# Altium footprint library MY_LIB_Connectors_CONNFLY.PcbLib: 239 footprints (part 1 of 15)
Each footprint in its own frame and in the unit in brackets; x right, y up, seen from the top. Pads: shape width x height; smd on the part's side, far side on the other; paste and mask are expansions set on the pad; w line width, h text height; cw(c..) or ccw(c..) is an arc to the next point about the centre after c.
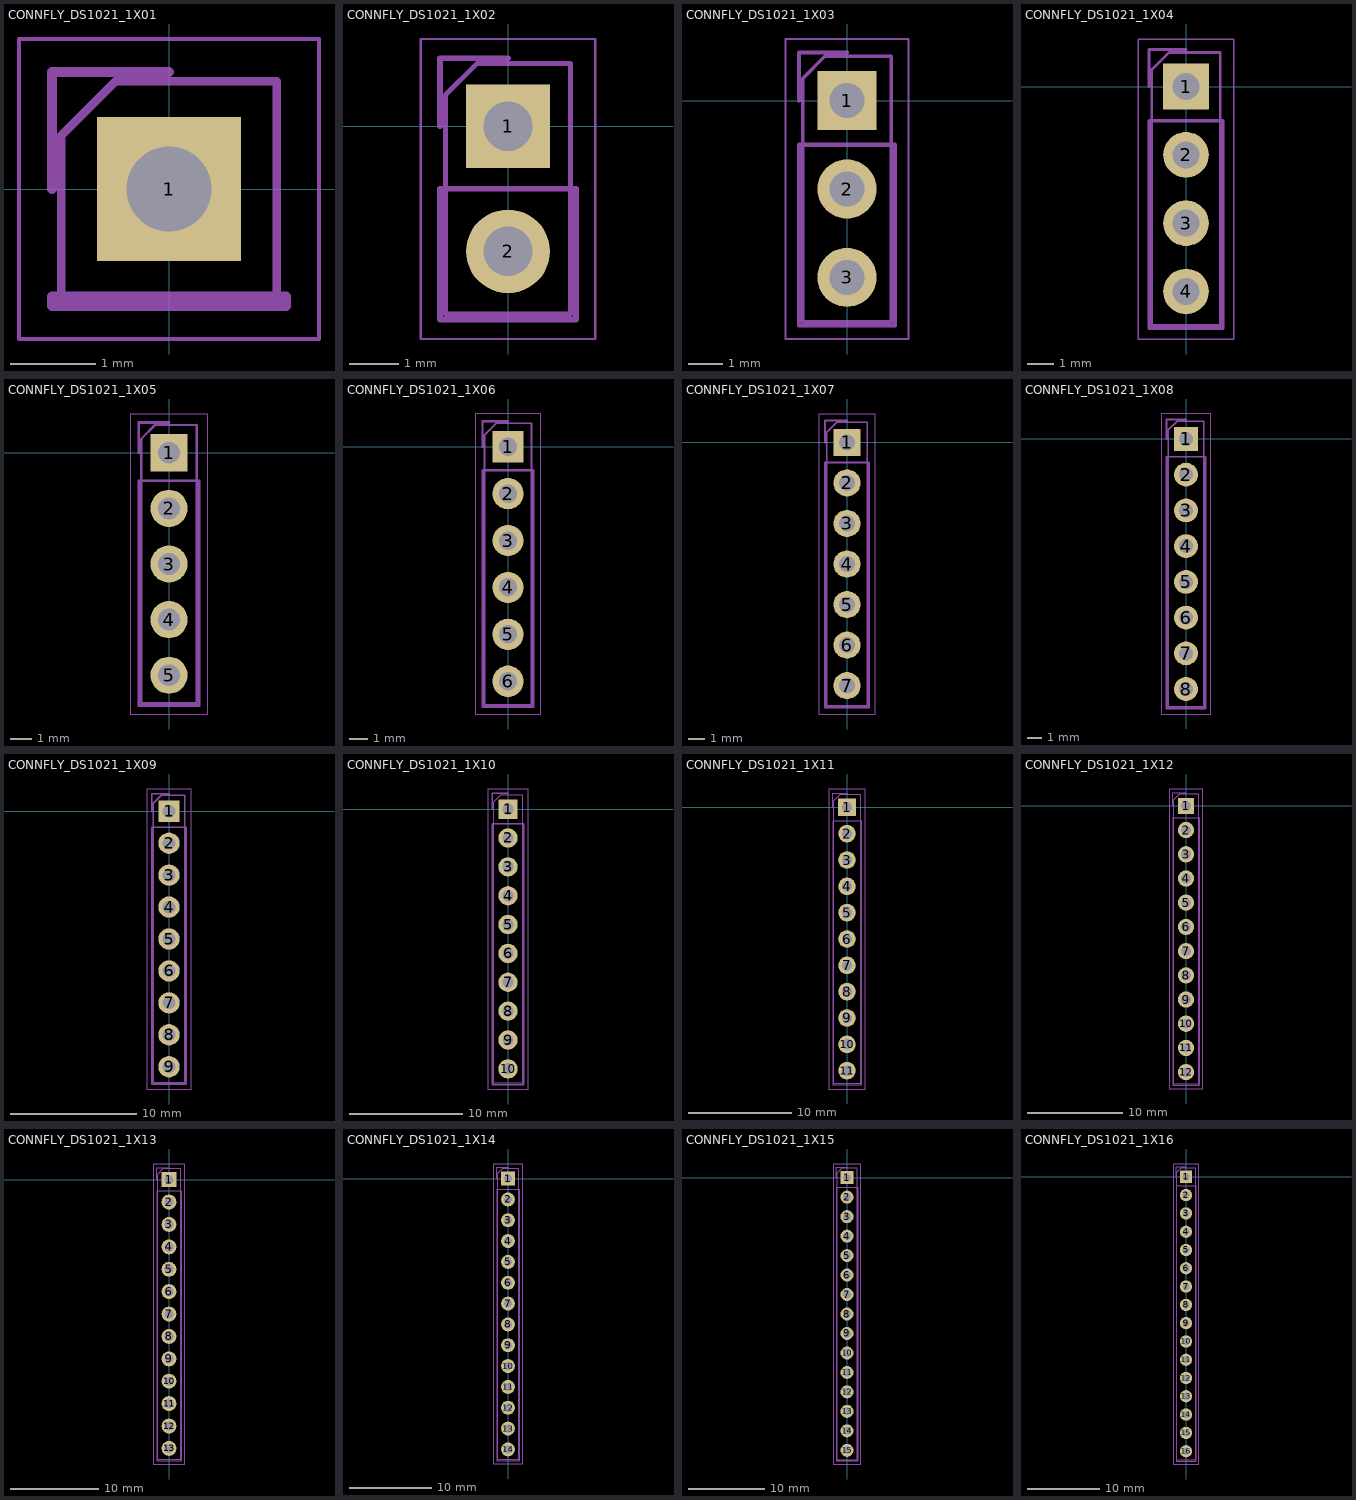
[diagram p0: the footprints below, top view; thin cyan lines are the x and y axes]

## CONNFLY_DS1021_1X01 [mm] "Connfly DS1021 1x1 standard KiCad; PTH1.0 pad1.7 pitch2.54; CC-BY-SA-4.0; STEP generic"
height 8.54
pads (1):
  rect 1.7x1.7 hole 1 paste-2539.97 mask+0.05: 1(0,0)
Mechanical 15:
  lines w0.05: -1.77,-1.77 1.77,-1.77 1.77,1.77 -1.77,1.77 -1.77,-1.77
  lines w0.1: -1.27,-1.27 1.27,-1.27 1.27,1.27 -0.635,1.27 -1.27,0.635 -1.27,-1.27
  lines w0.12: -1.38,0 -1.38,1.38 0,1.38 ; -1.38,-1.38 1.38,-1.38 1.38,-1.27 -1.38,-1.27 -1.38,-1.38
3D body "PinHeader_1x01_P2.54mm_Vertical.step": height 8.54, standoff -3, extent -1.27,-1.27 1.27,1.27

## CONNFLY_DS1021_1X02 [mm] "Connfly DS1021 1x2 standard KiCad; PTH1.0 pad1.7 pitch2.54; CC-BY-SA-4.0; STEP generic"
height 8.54
pads (2):
  rect 1.7x1.7 hole 1 paste-2539.97 mask+0.05: 1(0,0)
  round 1.7 hole 1 paste-2539.97 mask+0.05: 2(0,-2.54)
Mechanical 15:
  lines w0.05: -1.77,-4.32 -1.77,1.77 1.77,1.77 1.77,-4.32 -1.77,-4.32
  lines w0.1: -1.27,-3.81 -1.27,0.635 -0.635,1.27 1.27,1.27 1.27,-3.81 -1.27,-3.81
  lines w0.12: -1.38,0 -1.38,1.38 0,1.38 ; -1.38,-3.92 -1.38,-1.27 1.38,-1.27 1.38,-3.92 -1.38,-3.92
3D body "PinHeader_1x02_P2.54mm_Vertical.step": height 8.54, standoff -3, extent -1.27,-3.81 1.27,1.27

## CONNFLY_DS1021_1X03 [mm] "Connfly DS1021 1x3 standard KiCad; PTH1.0 pad1.7 pitch2.54; CC-BY-SA-4.0; STEP generic"
height 8.54
pads (3):
  rect 1.7x1.7 hole 1 paste-2539.97 mask+0.05: 1(0,0)
  round 1.7 hole 1 paste-2539.97 mask+0.05: 2(0,-2.54) 3(0,-5.08)
Mechanical 15:
  lines w0.05: -1.77,-6.85 -1.77,1.77 1.77,1.77 1.77,-6.85 -1.77,-6.85
  lines w0.1: -1.27,-6.35 -1.27,0.635 -0.635,1.27 1.27,1.27 1.27,-6.35 -1.27,-6.35
  lines w0.12: -1.38,0 -1.38,1.38 0,1.38 ; -1.38,-6.46 -1.38,-1.27 1.38,-1.27 1.38,-6.46 -1.38,-6.46
3D body "PinHeader_1x03_P2.54mm_Vertical.step": height 8.54, standoff -3, extent -1.27,-6.35 1.27,1.27

## CONNFLY_DS1021_1X04 [mm] "Connfly DS1021 1x4 standard KiCad; PTH1.0 pad1.7 pitch2.54; CC-BY-SA-4.0; STEP generic"
height 8.54
pads (4):
  rect 1.7x1.7 hole 1 paste-2539.97 mask+0.05: 1(0,0)
  round 1.7 hole 1 paste-2539.97 mask+0.05: 2(0,-2.54) 3(0,-5.08) 4(0,-7.62)
Mechanical 15:
  lines w0.05: -1.77,-9.39 -1.77,1.77 1.77,1.77 1.77,-9.39 -1.77,-9.39
  lines w0.1: -1.27,-8.89 -1.27,0.635 -0.635,1.27 1.27,1.27 1.27,-8.89 -1.27,-8.89
  lines w0.12: -1.38,0 -1.38,1.38 0,1.38 ; -1.38,-9 -1.38,-1.27 1.38,-1.27 1.38,-9 -1.38,-9
3D body "PinHeader_1x04_P2.54mm_Vertical.step": height 8.54, standoff -3, extent -1.27,-8.89 1.27,1.27

## CONNFLY_DS1021_1X05 [mm] "Connfly DS1021 1x5 standard KiCad; PTH1.0 pad1.7 pitch2.54; CC-BY-SA-4.0; STEP generic"
height 8.54
pads (5):
  rect 1.7x1.7 hole 1 paste-2539.97 mask+0.05: 1(0,0)
  round 1.7 hole 1 paste-2539.97 mask+0.05: 2(0,-2.54) 3(0,-5.08) 4(0,-7.62) 5(0,-10.16)
Mechanical 15:
  lines w0.05: -1.77,-11.93 -1.77,1.77 1.77,1.77 1.77,-11.93 -1.77,-11.93
  lines w0.1: -1.27,-11.43 -1.27,0.635 -0.635,1.27 1.27,1.27 1.27,-11.43 -1.27,-11.43
  lines w0.12: -1.38,0 -1.38,1.38 0,1.38 ; -1.38,-11.54 -1.38,-1.27 1.38,-1.27 1.38,-11.54 -1.38,-11.54
3D body "PinHeader_1x05_P2.54mm_Vertical.step": height 8.54, standoff -3, extent -1.27,-11.43 1.27,1.27

## CONNFLY_DS1021_1X06 [mm] "Connfly DS1021 1x6 standard KiCad; PTH1.0 pad1.7 pitch2.54; CC-BY-SA-4.0; STEP generic"
height 8.54
pads (6):
  rect 1.7x1.7 hole 1 paste-2539.97 mask+0.05: 1(0,0)
  round 1.7 hole 1 paste-2539.97 mask+0.05: 2(0,-2.54) 3(0,-5.08) 4(0,-7.62) 5(0,-10.16) 6(0,-12.7)
Mechanical 15:
  lines w0.05: -1.77,-14.47 -1.77,1.77 1.77,1.77 1.77,-14.47 -1.77,-14.47
  lines w0.1: -1.27,-13.97 -1.27,0.635 -0.635,1.27 1.27,1.27 1.27,-13.97 -1.27,-13.97
  lines w0.12: -1.38,0 -1.38,1.38 0,1.38 ; -1.38,-14.08 -1.38,-1.27 1.38,-1.27 1.38,-14.08 -1.38,-14.08
3D body "PinHeader_1x06_P2.54mm_Vertical.step": height 8.54, standoff -3, extent -1.27,-13.97 1.27,1.27

## CONNFLY_DS1021_1X07 [mm] "Connfly DS1021 1x7 standard KiCad; PTH1.0 pad1.7 pitch2.54; CC-BY-SA-4.0; STEP generic"
height 8.54
pads (7):
  rect 1.7x1.7 hole 1 paste-2539.97 mask+0.05: 1(0,0)
  round 1.7 hole 1 paste-2539.97 mask+0.05: 2(0,-2.54) 3(0,-5.08) 4(0,-7.62) 5(0,-10.16) 6(0,-12.7) 7(0,-15.24)
Mechanical 15:
  lines w0.05: -1.77,-17.02 -1.77,1.78 1.77,1.78 1.77,-17.02 -1.77,-17.02
  lines w0.1: -1.27,-16.51 -1.27,0.635 -0.635,1.27 1.27,1.27 1.27,-16.51 -1.27,-16.51
  lines w0.12: -1.38,0 -1.38,1.38 0,1.38 ; -1.38,-16.62 -1.38,-1.27 1.38,-1.27 1.38,-16.62 -1.38,-16.62
3D body "PinHeader_1x07_P2.54mm_Vertical.step": height 8.54, standoff -3, extent -1.27,-16.51 1.27,1.27

## CONNFLY_DS1021_1X08 [mm] "Connfly DS1021 1x8 standard KiCad; PTH1.0 pad1.7 pitch2.54; CC-BY-SA-4.0; STEP generic"
height 8.54
pads (8):
  rect 1.7x1.7 hole 1 paste-2539.97 mask+0.05: 1(0,0)
  round 1.7 hole 1 paste-2539.97 mask+0.05: 2(0,-2.54) 3(0,-5.08) 4(0,-7.62) 5(0,-10.16) 6(0,-12.7) 7(0,-15.24) 8(0,-17.78)
Mechanical 15:
  lines w0.05: -1.77,-19.55 -1.77,1.77 1.77,1.77 1.77,-19.55 -1.77,-19.55
  lines w0.1: -1.27,-19.05 -1.27,0.635 -0.635,1.27 1.27,1.27 1.27,-19.05 -1.27,-19.05
  lines w0.12: -1.38,0 -1.38,1.38 0,1.38 ; -1.38,-19.16 -1.38,-1.27 1.38,-1.27 1.38,-19.16 -1.38,-19.16
3D body "PinHeader_1x08_P2.54mm_Vertical.step": height 8.54, standoff -3, extent -1.27,-19.05 1.27,1.27

## CONNFLY_DS1021_1X09 [mm] "Connfly DS1021 1x9 standard KiCad; PTH1.0 pad1.7 pitch2.54; CC-BY-SA-4.0; STEP generic"
height 8.54
pads (9):
  rect 1.7x1.7 hole 1 paste-2539.97 mask+0.05: 1(0,0)
  round 1.7 hole 1 paste-2539.97 mask+0.05: 2(0,-2.54) 3(0,-5.08) 4(0,-7.62) 5(0,-10.16) 6(0,-12.7) 7(0,-15.24) 8(0,-17.78) 9(0,-20.32)
Mechanical 15:
  lines w0.05: -1.77,-22.09 -1.77,1.77 1.77,1.77 1.77,-22.09 -1.77,-22.09
  lines w0.1: -1.27,-21.59 -1.27,0.635 -0.635,1.27 1.27,1.27 1.27,-21.59 -1.27,-21.59
  lines w0.12: -1.38,0 -1.38,1.38 0,1.38 ; -1.38,-21.7 -1.38,-1.27 1.38,-1.27 1.38,-21.7 -1.38,-21.7
3D body "PinHeader_1x09_P2.54mm_Vertical.step": height 8.54, standoff -3, extent -1.27,-21.59 1.27,1.27

## CONNFLY_DS1021_1X10 [mm] "Connfly DS1021 1x10 standard KiCad; PTH1.0 pad1.7 pitch2.54; CC-BY-SA-4.0; STEP generic"
height 8.54
pads (10):
  rect 1.7x1.7 hole 1 paste-2539.97 mask+0.05: 1(0,0)
  round 1.7 hole 1 paste-2539.97 mask+0.05: 2(0,-2.54) 3(0,-5.08) 4(0,-7.62) 5(0,-10.16) 6(0,-12.7) 7(0,-15.24) 8(0,-17.78) 9(0,-20.32) 10(0,-22.86)
Mechanical 15:
  lines w0.05: -1.77,-24.63 -1.77,1.77 1.77,1.77 1.77,-24.63 -1.77,-24.63
  lines w0.1: -1.27,-24.13 -1.27,0.635 -0.635,1.27 1.27,1.27 1.27,-24.13 -1.27,-24.13
  lines w0.12: -1.38,0 -1.38,1.38 0,1.38 ; -1.38,-24.24 -1.38,-1.27 1.38,-1.27 1.38,-24.24 -1.38,-24.24
3D body "PinHeader_1x10_P2.54mm_Vertical.step": height 8.54, standoff -3, extent -1.27,-24.13 1.27,1.27

## CONNFLY_DS1021_1X11 [mm] "Connfly DS1021 1x11 standard KiCad; PTH1.0 pad1.7 pitch2.54; CC-BY-SA-4.0; STEP generic"
height 8.54
pads (11):
  rect 1.7x1.7 hole 1 paste-2539.97 mask+0.05: 1(0,0)
  round 1.7 hole 1 paste-2539.97 mask+0.05: 2(0,-2.54) 3(0,-5.08) 4(0,-7.62) 5(0,-10.16) 6(0,-12.7) 7(0,-15.24) 8(0,-17.78) 9(0,-20.32) 10(0,-22.86) 11(0,-25.4)
Mechanical 15:
  lines w0.05: -1.77,-27.17 -1.77,1.77 1.77,1.77 1.77,-27.17 -1.77,-27.17
  lines w0.1: -1.27,-26.67 -1.27,0.635 -0.635,1.27 1.27,1.27 1.27,-26.67 -1.27,-26.67
  lines w0.12: -1.38,0 -1.38,1.38 0,1.38 ; -1.38,-26.78 -1.38,-1.27 1.38,-1.27 1.38,-26.78 -1.38,-26.78
3D body "PinHeader_1x11_P2.54mm_Vertical.step": height 8.54, standoff -3, extent -1.27,-26.67 1.27,1.27

## CONNFLY_DS1021_1X12 [mm] "Connfly DS1021 1x12 standard KiCad; PTH1.0 pad1.7 pitch2.54; CC-BY-SA-4.0; STEP generic"
height 8.54
pads (12):
  rect 1.7x1.7 hole 1 paste-2539.97 mask+0.05: 1(0,0)
  round 1.7 hole 1 paste-2539.97 mask+0.05: 2(0,-2.54) 3(0,-5.08) 4(0,-7.62) 5(0,-10.16) 6(0,-12.7) 7(0,-15.24) 8(0,-17.78) 9(0,-20.32) 10(0,-22.86) 11(0,-25.4) 12(0,-27.94)
Mechanical 15:
  lines w0.05: -1.77,-29.71 -1.77,1.77 1.77,1.77 1.77,-29.71 -1.77,-29.71
  lines w0.1: -1.27,-29.21 -1.27,0.635 -0.635,1.27 1.27,1.27 1.27,-29.21 -1.27,-29.21
  lines w0.12: -1.38,0 -1.38,1.38 0,1.38 ; -1.38,-29.32 -1.38,-1.27 1.38,-1.27 1.38,-29.32 -1.38,-29.32
3D body "PinHeader_1x12_P2.54mm_Vertical.step": height 8.54, standoff -3, extent -1.27,-29.21 1.27,1.27

## CONNFLY_DS1021_1X13 [mm] "Connfly DS1021 1x13 standard KiCad; PTH1.0 pad1.7 pitch2.54; CC-BY-SA-4.0; STEP generic"
height 8.54
pads (13):
  rect 1.7x1.7 hole 1 paste-2539.97 mask+0.05: 1(0,0)
  round 1.7 hole 1 paste-2539.97 mask+0.05: 2(0,-2.54) 3(0,-5.08) 4(0,-7.62) 5(0,-10.16) 6(0,-12.7) 7(0,-15.24) 8(0,-17.78) 9(0,-20.32) 10(0,-22.86) 11(0,-25.4) 12(0,-27.94) 13(0,-30.48)
Mechanical 15:
  lines w0.05: -1.77,-32.25 -1.77,1.78 1.77,1.78 1.77,-32.25 -1.77,-32.25
  lines w0.1: -1.27,-31.75 -1.27,0.635 -0.635,1.27 1.27,1.27 1.27,-31.75 -1.27,-31.75
  lines w0.12: -1.38,0 -1.38,1.38 0,1.38 ; -1.38,-31.86 -1.38,-1.27 1.38,-1.27 1.38,-31.86 -1.38,-31.86
3D body "PinHeader_1x13_P2.54mm_Vertical.step": height 8.54, standoff -3, extent -1.27,-31.75 1.27,1.27

## CONNFLY_DS1021_1X14 [mm] "Connfly DS1021 1x14 standard KiCad; PTH1.0 pad1.7 pitch2.54; CC-BY-SA-4.0; STEP generic"
height 8.54
pads (14):
  rect 1.7x1.7 hole 1 paste-2539.97 mask+0.05: 1(0,0)
  round 1.7 hole 1 paste-2539.97 mask+0.05: 2(0,-2.54) 3(0,-5.08) 4(0,-7.62) 5(0,-10.16) 6(0,-12.7) 7(0,-15.24) 8(0,-17.78) 9(0,-20.32) 10(0,-22.86) 11(0,-25.4) 12(0,-27.94) 13(0,-30.48) 14(0,-33.02)
Mechanical 15:
  lines w0.05: -1.77,-34.8 -1.77,1.78 1.77,1.78 1.77,-34.8 -1.77,-34.8
  lines w0.1: -1.27,-34.29 -1.27,0.635 -0.635,1.27 1.27,1.27 1.27,-34.29 -1.27,-34.29
  lines w0.12: -1.38,0 -1.38,1.38 0,1.38 ; -1.38,-34.4 -1.38,-1.27 1.38,-1.27 1.38,-34.4 -1.38,-34.4
3D body "PinHeader_1x14_P2.54mm_Vertical.step": height 8.54, standoff -3, extent -1.27,-34.29 1.27,1.27

## CONNFLY_DS1021_1X15 [mm] "Connfly DS1021 1x15 standard KiCad; PTH1.0 pad1.7 pitch2.54; CC-BY-SA-4.0; STEP generic"
height 8.54
pads (15):
  rect 1.7x1.7 hole 1 paste-2539.97 mask+0.05: 1(0,0)
  round 1.7 hole 1 paste-2539.97 mask+0.05: 2(0,-2.54) 3(0,-5.08) 4(0,-7.62) 5(0,-10.16) 6(0,-12.7) 7(0,-15.24) 8(0,-17.78) 9(0,-20.32) 10(0,-22.86) 11(0,-25.4) 12(0,-27.94) 13(0,-30.48) 14(0,-33.02) 15(0,-35.56)
Mechanical 15:
  lines w0.05: -1.77,-37.34 -1.77,1.78 1.77,1.78 1.77,-37.34 -1.77,-37.34
  lines w0.1: -1.27,-36.83 -1.27,0.635 -0.635,1.27 1.27,1.27 1.27,-36.83 -1.27,-36.83
  lines w0.12: -1.38,0 -1.38,1.38 0,1.38 ; -1.38,-36.94 -1.38,-1.27 1.38,-1.27 1.38,-36.94 -1.38,-36.94
3D body "PinHeader_1x15_P2.54mm_Vertical.step": height 8.54, standoff -3, extent -1.27,-36.83 1.27,1.27

## CONNFLY_DS1021_1X16 [mm] "Connfly DS1021 1x16 standard KiCad; PTH1.0 pad1.7 pitch2.54; CC-BY-SA-4.0; STEP generic"
height 8.54
pads (16):
  rect 1.7x1.7 hole 1 paste-2539.97 mask+0.05: 1(0,0)
  round 1.7 hole 1 paste-2539.97 mask+0.05: 2(0,-2.54) 3(0,-5.08) 4(0,-7.62) 5(0,-10.16) 6(0,-12.7) 7(0,-15.24) 8(0,-17.78) 9(0,-20.32) 10(0,-22.86) 11(0,-25.4) 12(0,-27.94) 13(0,-30.48) 14(0,-33.02) 15(0,-35.56) 16(0,-38.1)
Mechanical 15:
  lines w0.05: -1.77,-39.88 -1.77,1.78 1.77,1.78 1.77,-39.88 -1.77,-39.88
  lines w0.1: -1.27,-39.37 -1.27,0.635 -0.635,1.27 1.27,1.27 1.27,-39.37 -1.27,-39.37
  lines w0.12: -1.38,0 -1.38,1.38 0,1.38 ; -1.38,-39.48 -1.38,-1.27 1.38,-1.27 1.38,-39.48 -1.38,-39.48
3D body "PinHeader_1x16_P2.54mm_Vertical.step": height 8.54, standoff -3, extent -1.27,-39.37 1.27,1.27